# Altium footprint library WR-PHD_Pin Header_2.00mm.PcbLib: 63 footprints (part 2 of 4)
Each footprint in its own frame and in the unit in brackets; x right, y up, seen from the top. Pads: shape width x height; smd on the part's side, far side on the other; paste and mask are expansions set on the pad; w line width, h text height; cw(c..) or ccw(c..) is an arc to the next point about the centre after c.
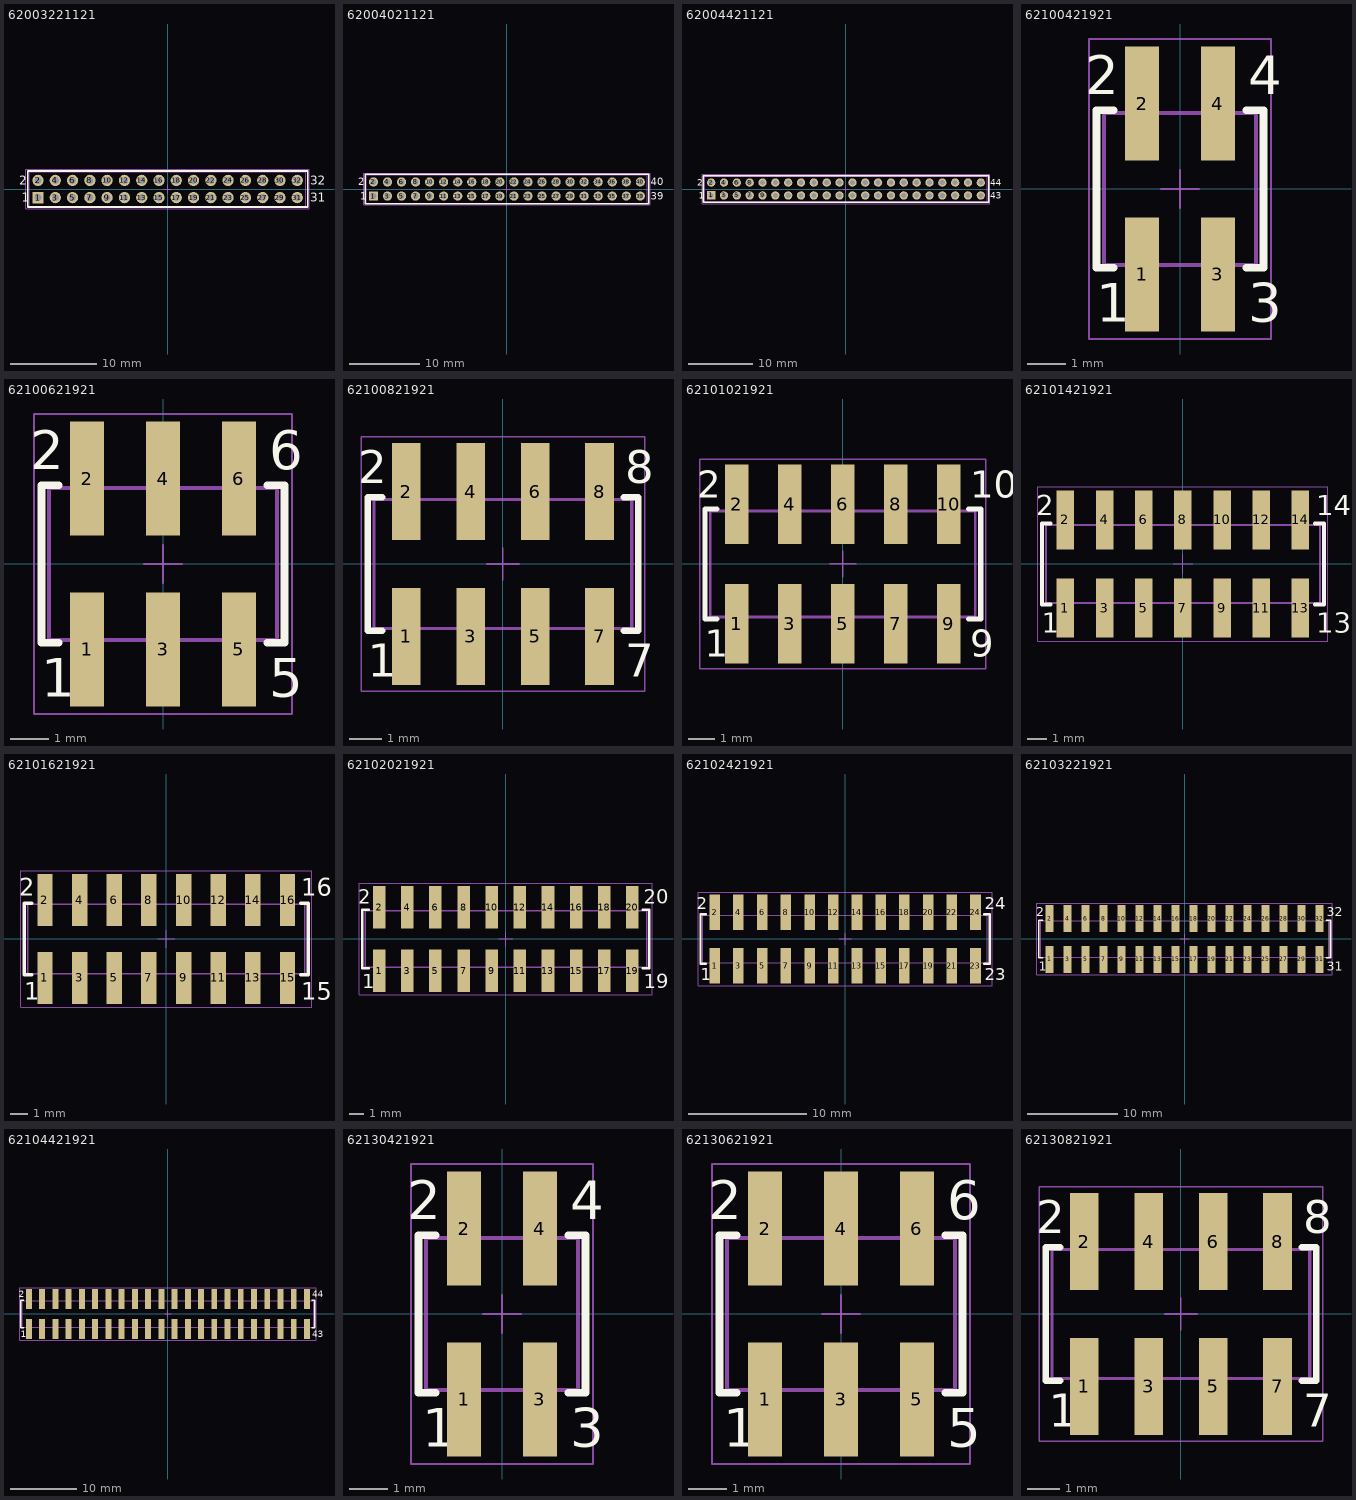
[diagram p1: the footprints below, top view; thin cyan lines are the x and y axes]

## 62003221121 [mm] "2.00 mm THT Dual Pin Header, 32p"
height 6
pads (32):
  rect 1.3x1.3 hole 0.8: 1(-15,-1)
  round 1.3 hole 0.8: 2(-15,1) 3(-13,-1) 4(-13,1) 5(-11,-1) 6(-11,1) 7(-9,-1) 8(-9,1) 9(-7,-1) 10(-7,1) 11(-5,-1) 12(-5,1) 13(-3,-1) 14(-3,1) 15(-1,-1) 16(-1,1) 17(1,-1) 18(1,1) 19(3,-1) 20(3,1) 21(5,-1) 22(5,1) 23(7,-1) 24(7,1) 25(9,-1) 26(9,1) 27(11,-1) 28(11,1) 29(13,-1) 30(13,1) 31(15,-1) 32(15,1)
Top Overlay:
  lines w0.2: -16.2,-2.075 -16.2,2.075 16.2,2.075 16.2,-2.075 -16.2,-2.075
  text "1" at -16.9,-1.5 h1.02
  text "2" at -17.2,0.5 h1.02
  text "32" at 16.5,0.5 h1.02
  text "31" at 16.5,-1.5 h1.02
Mechanical 13:
  lines w0.1: -16,-2 -16,2 16,2 16,-2 -16,-2
Mechanical 15:
  lines w0.05: -0.5,0 0.5,0 ; 0,-0.5 0,0.5 ; -16.4,-2.275 16.4,-2.275 16.4,2.275 -16.4,2.275 -16.4,-2.275
3D body "62003221121.stp": height 6.05, standoff -2.65, extent -16,-2 16,2

## 62004021121 [mm] "2.00 mm THT Dual Pin Header, 40p"
height 6
pads (40):
  rect 1.3x1.3 hole 0.8: 1(-19,-1)
  round 1.3 hole 0.8: 2(-19,1) 3(-17,-1) 4(-17,1) 5(-15,-1) 6(-15,1) 7(-13,-1) 8(-13,1) 9(-11,-1) 10(-11,1) 11(-9,-1) 12(-9,1) 13(-7,-1) 14(-7,1) 15(-5,-1) 16(-5,1) 17(-3,-1) 18(-3,1) 19(-1,-1) 20(-1,1) 21(1,-1) 22(1,1) 23(3,-1) 24(3,1) 25(5,-1) 26(5,1) 27(7,-1) 28(7,1) 29(9,-1) 30(9,1) 31(11,-1) 32(11,1) 33(13,-1) 34(13,1) 35(15,-1) 36(15,1) 37(17,-1) 38(17,1) 39(19,-1) 40(19,1)
Top Overlay:
  lines w0.2: -20.2,-2.075 20.2,-2.075 20.2,2.075 -20.2,2.075 -20.2,-2.075
  text "2" at -21.2,0.5 h1.02
  text "1" at -20.9,-1.5 h1.02
  text "40" at 20.5,0.5 h1.02
  text "39" at 20.5,-1.5 h1.02
Mechanical 13:
  lines w0.1: -20,-2 20,-2 20,2 -20,2 -20,-2
Mechanical 15:
  lines w0.05: -0.5,0 0.5,0 ; 0,-0.5 0,0.5 ; -20.4,-2.275 -20.4,2.275 20.4,2.275 20.4,-2.275 -20.4,-2.275
3D body "62004021121.stp": height 6.05, standoff -2.65, extent -20,-2 20,2

## 62004421121 [mm] "2.00 mm THT Dual Pin Header, 44p"
height 6
pads (44):
  rect 1.3x1.3 hole 0.8: 1(-21,-1)
  round 1.3 hole 0.8: 2(-21,1) 3(-19,-1) 4(-19,1) 5(-17,-1) 6(-17,1) 7(-15,-1) 8(-15,1) 9(-13,-1) 10(-13,1) 11(-11,-1) 12(-11,1) 13(-9,-1) 14(-9,1) 15(-7,-1) 16(-7,1) 17(-5,-1) 18(-5,1) 19(-3,-1) 20(-3,1) 21(-1,-1) 22(-1,1) 23(1,-1) 24(1,1) 25(3,-1) 26(3,1) 27(5,-1) 28(5,1) 29(7,-1) 30(7,1) 31(9,-1) 32(9,1) 33(11,-1) 34(11,1) 35(13,-1) 36(13,1) 37(15,-1) 38(15,1) 39(17,-1) 40(17,1) 41(19,-1) 42(19,1) 43(21,-1) 44(21,1)
Top Overlay:
  lines w0.2: -22.2,-2.075 -22.2,2.075 22.2,2.075 22.2,-2.075 -22.2,-2.075
  text "43" at 22.5,-1.5 h1.02
  text "44" at 22.5,0.5 h1.02
  text "1" at -22.9,-1.5 h1.02
  text "2" at -23.2,0.5 h1.02
Mechanical 13:
  lines w0.1: -22,-2 -22,2 22,2 22,-2 -22,-2
Mechanical 15:
  lines w0.05: -0.5,0 0.5,0 ; 0,-0.5 0,0.5 ; -22.4,-2.275 22.4,-2.275 22.4,2.275 -22.4,2.275 -22.4,-2.275
3D body "62004421121.stp": height 6.05, standoff -2.65, extent -22,-2 22,2

## 62100421921 [mm] "Pin Header, pitch 2.00 mm, SMD, Vertical, dual row, 4p"
height 6.8
pads (4):
  rect 0.89x3 smd: 1(-1,-2.25) 2(-1,2.25) 3(1,-2.25) 4(1,2.25)
Top Overlay:
  lines w0.2: -1.75,-2.075 -2.2,-2.075 -2.2,2.075 -1.75,2.075 ; 1.75,-2.075 2.2,-2.075 2.2,2.075 1.75,2.075
  text "1" at -2.2,-3.5 h1.02
  text "3" at 1.8,-3.5 h1.02
  text "2" at -2.5,2.5 h1.02
  text "4" at 1.8,2.5 h1.02
Mechanical 13:
  lines w0.1: -1.25,-2 -1.25,-3.1 -0.75,-3.1 -0.75,-2 ; -1.25,2 -1.25,3.1 -0.75,3.1 -0.75,2 ; 0.75,-2 0.75,-3.1 1.25,-3.1 1.25,-2 ; 0.75,2 0.75,3.1 1.25,3.1 1.25,2 ; -2,-2 -2,2 2,2 2,-2 -2,-2
Mechanical 15:
  lines w0.05: -0.5,0 0.5,0 ; 0,-0.5 0,0.5 ; -2.4,-3.95 2.4,-3.95 2.4,3.95 -2.4,3.95 -2.4,-3.95
3D body "62100421921.stp": height 6.7, standoff 0, extent -2,-3.1 2,3.1

## 62100621921 [mm] "Pin Header, pitch 2.00 mm, SMD, Vertical, dual row, 6p"
height 6.8
pads (6):
  rect 0.89x3 smd: 1(-2,-2.25) 2(-2,2.25) 3(0,-2.25) 4(0,2.25) 5(2,-2.25) 6(2,2.25)
Top Overlay:
  lines w0.2: -2.75,-2.075 -3.2,-2.075 -3.2,2.075 -2.75,2.075 ; 2.75,-2.075 3.2,-2.075 3.2,2.075 2.75,2.075
  text "2" at -3.5,2.5 h1.02
  text "1" at -3.2,-3.5 h1.02
  text "5" at 2.8,-3.5 h1.02
  text "6" at 2.8,2.5 h1.02
Mechanical 13:
  lines w0.1: -2.25,-2 -2.25,-3.1 -1.75,-3.1 -1.75,-2 ; -2.25,2 -2.25,3.1 -1.75,3.1 -1.75,2 ; -0.25,-2 -0.25,-3.1 0.25,-3.1 0.25,-2 ; -0.25,2 -0.25,3.1 0.25,3.1 0.25,2 ; 1.75,-2 1.75,-3.1 2.25,-3.1 2.25,-2 ; 1.75,2 1.75,3.1 2.25,3.1 2.25,2 ; -3,-2 3,-2 3,2 -3,2 -3,-2
Mechanical 15:
  lines w0.05: -0.5,0 0.5,0 ; 0,-0.5 0,0.5 ; -3.4,-3.95 -3.4,3.95 3.4,3.95 3.4,-3.95 -3.4,-3.95
3D body "62100621921.stp": height 6.7, standoff 0, extent -3,-3.1 3,3.1

## 62100821921 [mm] "Pin Header, pitch 2.00 mm, SMD, Vertical, dual row, 8p"
height 6.8
pads (8):
  rect 0.89x3 smd: 1(-3,-2.25) 2(-3,2.25) 3(-1,-2.25) 4(-1,2.25) 5(1,-2.25) 6(1,2.25) 7(3,-2.25) 8(3,2.25)
Top Overlay:
  lines w0.2: -3.75,-2.075 -4.2,-2.075 -4.2,2.075 -3.75,2.075 ; 3.75,-2.075 4.2,-2.075 4.2,2.075 3.75,2.075
  text "1" at -4.2,-3.5 h1.02
  text "2" at -4.5,2.5 h1.02
  text "7" at 3.8,-3.5 h1.02
  text "8" at 3.8,2.5 h1.02
Mechanical 13:
  lines w0.1: -3.25,-2 -3.25,-3.1 -2.75,-3.1 -2.75,-2 ; -3.25,2 -3.25,3.1 -2.75,3.1 -2.75,2 ; -1.25,-2 -1.25,-3.1 -0.75,-3.1 -0.75,-2 ; -1.25,2 -1.25,3.1 -0.75,3.1 -0.75,2 ; 0.75,-2 0.75,-3.1 1.25,-3.1 1.25,-2 ; 0.75,2 0.75,3.1 1.25,3.1 1.25,2 ; 2.75,-2 2.75,-3.1 3.25,-3.1 3.25,-2 ; 2.75,2 2.75,3.1 3.25,3.1 3.25,2 ; -4,-2 -4,2 4,2 4,-2 -4,-2
Mechanical 15:
  lines w0.05: -0.5,0 0.5,0 ; 0,-0.5 0,0.5 ; -4.4,-3.95 4.4,-3.95 4.4,3.95 -4.4,3.95 -4.4,-3.95
3D body "62100821921.stp": height 6.7, standoff 0, extent -4,-3.1 4,3.1

## 62101021921 [mm] "Pin Header, pitch 2.00 mm, SMD, Vertical, dual row, 10p"
height 6.8
pads (10):
  rect 0.89x3 smd: 1(-4,-2.25) 2(-4,2.25) 3(-2,-2.25) 4(-2,2.25) 5(0,-2.25) 6(0,2.25) 7(2,-2.25) 8(2,2.25) 9(4,-2.25) 10(4,2.25)
Top Overlay:
  lines w0.2: -4.75,-2.075 -5.2,-2.075 -5.2,2.075 -4.75,2.075 ; 4.75,-2.075 5.2,-2.075 5.2,2.075 4.75,2.075
  text "1" at -5.2,-3.5 h1.02
  text "2" at -5.5,2.5 h1.02
  text "9" at 4.8,-3.5 h1.02
  text "10" at 4.8,2.5 h1.02
Mechanical 13:
  lines w0.1: -4.25,-2 -4.25,-3.1 -3.75,-3.1 -3.75,-2 ; -4.25,2 -4.25,3.1 -3.75,3.1 -3.75,2 ; -2.25,-2 -2.25,-3.1 -1.75,-3.1 -1.75,-2 ; -2.25,2 -2.25,3.1 -1.75,3.1 -1.75,2 ; -0.25,-2 -0.25,-3.1 0.25,-3.1 0.25,-2 ; -0.25,2 -0.25,3.1 0.25,3.1 0.25,2 ; 1.75,-2 1.75,-3.1 2.25,-3.1 2.25,-2 ; 1.75,2 1.75,3.1 2.25,3.1 2.25,2 ; 3.75,-2 3.75,-3.1 4.25,-3.1 4.25,-2 ; 3.75,2 3.75,3.1 4.25,3.1 4.25,2 ; -5,-2 -5,2 5,2 5,-2 -5,-2
Mechanical 15:
  lines w0.05: -0.5,0 0.5,0 ; 0,-0.5 0,0.5 ; -5.4,-3.95 5.4,-3.95 5.4,3.95 -5.4,3.95 -5.4,-3.95
3D body "62101021921.stp": height 6.7, standoff 0, extent -5,-3.1 5,3.1

## 62101421921 [mm] "Pin Header, pitch 2.00 mm, SMD, Vertical, dual row, 14p"
height 6.8
pads (14):
  rect 0.89x3 smd: 1(-6,-2.25) 2(-6,2.25) 3(-4,-2.25) 4(-4,2.25) 5(-2,-2.25) 6(-2,2.25) 7(0,-2.25) 8(0,2.25) 9(2,-2.25) 10(2,2.25) 11(4,-2.25) 12(4,2.25) 13(6,-2.25) 14(6,2.25)
Top Overlay:
  lines w0.2: -6.75,-2.075 -7.2,-2.075 -7.2,2.075 -6.75,2.075 ; 6.75,-2.075 7.2,-2.075 7.2,2.075 6.75,2.075
  text "1" at -7.2,-3.5 h1.02
  text "2" at -7.5,2.5 h1.02
  text "13" at 6.8,-3.5 h1.02
  text "14" at 6.8,2.5 h1.02
Mechanical 13:
  lines w0.1: -6.25,-2 -6.25,-3.1 -5.75,-3.1 -5.75,-2 ; -6.25,2 -6.25,3.1 -5.75,3.1 -5.75,2 ; -4.25,-2 -4.25,-3.1 -3.75,-3.1 -3.75,-2 ; -4.25,2 -4.25,3.1 -3.75,3.1 -3.75,2 ; -2.25,-2 -2.25,-3.1 -1.75,-3.1 -1.75,-2 ; -2.25,2 -2.25,3.1 -1.75,3.1 -1.75,2 ; -0.25,-2 -0.25,-3.1 0.25,-3.1 0.25,-2 ; -0.25,2 -0.25,3.1 0.25,3.1 0.25,2 ; 1.75,-2 1.75,-3.1 2.25,-3.1 2.25,-2 ; 1.75,2 1.75,3.1 2.25,3.1 2.25,2 ; 3.75,-2 3.75,-3.1 4.25,-3.1 4.25,-2 ; 3.75,2 3.75,3.1 4.25,3.1 4.25,2 ; 5.75,-2 5.75,-3.1 6.25,-3.1 6.25,-2 ; 5.75,2 5.75,3.1 6.25,3.1 6.25,2 ; -7,-2 -7,2 7,2 7,-2 -7,-2
Mechanical 15:
  lines w0.05: -0.5,0 0.5,0 ; 0,-0.5 0,0.5 ; -7.4,-3.95 7.4,-3.95 7.4,3.95 -7.4,3.95 -7.4,-3.95
3D body "62101421921.stp": height 6.7, standoff 0, extent -7,-3.1 7,3.1

## 62101621921 [mm] "Pin Header, pitch 2.00 mm, SMD, Vertical, dual row, 16p"
height 6.8
pads (16):
  rect 0.89x3 smd: 1(-7,-2.25) 2(-7,2.25) 3(-5,-2.25) 4(-5,2.25) 5(-3,-2.25) 6(-3,2.25) 7(-1,-2.25) 8(-1,2.25) 9(1,-2.25) 10(1,2.25) 11(3,-2.25) 12(3,2.25) 13(5,-2.25) 14(5,2.25) 15(7,-2.25) 16(7,2.25)
Top Overlay:
  lines w0.2: -7.75,-2.075 -8.2,-2.075 -8.2,2.075 -7.75,2.075 ; 7.75,-2.075 8.2,-2.075 8.2,2.075 7.75,2.075
  text "16" at 7.8,2.5 h1.02
  text "15" at 7.8,-3.5 h1.02
  text "2" at -8.5,2.5 h1.02
  text "1" at -8.2,-3.5 h1.02
Mechanical 13:
  lines w0.1: -7.25,-2 -7.25,-3.1 -6.75,-3.1 -6.75,-2 ; -7.25,2 -7.25,3.1 -6.75,3.1 -6.75,2 ; -5.25,-2 -5.25,-3.1 -4.75,-3.1 -4.75,-2 ; -5.25,2 -5.25,3.1 -4.75,3.1 -4.75,2 ; -3.25,-2 -3.25,-3.1 -2.75,-3.1 -2.75,-2 ; -3.25,2 -3.25,3.1 -2.75,3.1 -2.75,2 ; -1.25,-2 -1.25,-3.1 -0.75,-3.1 -0.75,-2 ; -1.25,2 -1.25,3.1 -0.75,3.1 -0.75,2 ; 0.75,-2 0.75,-3.1 1.25,-3.1 1.25,-2 ; 0.75,2 0.75,3.1 1.25,3.1 1.25,2 ; 2.75,-2 2.75,-3.1 3.25,-3.1 3.25,-2 ; 2.75,2 2.75,3.1 3.25,3.1 3.25,2 ; 4.75,-2 4.75,-3.1 5.25,-3.1 5.25,-2 ; 4.75,2 4.75,3.1 5.25,3.1 5.25,2 ; 6.75,-2 6.75,-3.1 7.25,-3.1 7.25,-2 ; 6.75,2 6.75,3.1 7.25,3.1 7.25,2 ; -8,-2 8,-2 8,2 -8,2 -8,-2
Mechanical 15:
  lines w0.05: -0.5,0 0.5,0 ; 0,-0.5 0,0.5 ; -8.4,-3.95 -8.4,3.95 8.4,3.95 8.4,-3.95 -8.4,-3.95
3D body "62101621921.stp": height 6.7, standoff 0, extent -8,-3.1 8,3.1

## 62102021921 [mm] "Pin Header, pitch 2.00 mm, SMD, Vertical, dual row, 20p"
height 6.8
pads (20):
  rect 0.89x3 smd: 1(-9,-2.25) 2(-9,2.25) 3(-7,-2.25) 4(-7,2.25) 5(-5,-2.25) 6(-5,2.25) 7(-3,-2.25) 8(-3,2.25) 9(-1,-2.25) 10(-1,2.25) 11(1,-2.25) 12(1,2.25) 13(3,-2.25) 14(3,2.25) 15(5,-2.25) 16(5,2.25) 17(7,-2.25) 18(7,2.25) 19(9,-2.25) 20(9,2.25)
Top Overlay:
  lines w0.2: -9.75,-2.075 -10.2,-2.075 -10.2,2.075 -9.75,2.075 ; 9.75,-2.075 10.2,-2.075 10.2,2.075 9.75,2.075
  text "20" at 9.8,2.5 h1.02
  text "19" at 9.8,-3.5 h1.02
  text "2" at -10.5,2.5 h1.02
  text "1" at -10.2,-3.5 h1.02
Mechanical 13:
  lines w0.1: -9.25,-2 -9.25,-3.1 -8.75,-3.1 -8.75,-2 ; -9.25,2 -9.25,3.1 -8.75,3.1 -8.75,2 ; -7.25,-2 -7.25,-3.1 -6.75,-3.1 -6.75,-2 ; -7.25,2 -7.25,3.1 -6.75,3.1 -6.75,2 ; -5.25,-2 -5.25,-3.1 -4.75,-3.1 -4.75,-2 ; -5.25,2 -5.25,3.1 -4.75,3.1 -4.75,2 ; -3.25,-2 -3.25,-3.1 -2.75,-3.1 -2.75,-2 ; -3.25,2 -3.25,3.1 -2.75,3.1 -2.75,2 ; -1.25,-2 -1.25,-3.1 -0.75,-3.1 -0.75,-2 ; -1.25,2 -1.25,3.1 -0.75,3.1 -0.75,2 ; 0.75,-2 0.75,-3.1 1.25,-3.1 1.25,-2 ; 0.75,2 0.75,3.1 1.25,3.1 1.25,2 ; 2.75,-2 2.75,-3.1 3.25,-3.1 3.25,-2 ; 2.75,2 2.75,3.1 3.25,3.1 3.25,2 ; 4.75,-2 4.75,-3.1 5.25,-3.1 5.25,-2 ; 4.75,2 4.75,3.1 5.25,3.1 5.25,2 ; 6.75,-2 6.75,-3.1 7.25,-3.1 7.25,-2 ; 6.75,2 6.75,3.1 7.25,3.1 7.25,2 ; 8.75,-2 8.75,-3.1 9.25,-3.1 9.25,-2 ; 8.75,2 8.75,3.1 9.25,3.1 9.25,2 ; -10,-2 10,-2 10,2 -10,2 -10,-2
Mechanical 15:
  lines w0.05: -0.5,0 0.5,0 ; 0,-0.5 0,0.5 ; -10.4,-3.95 -10.4,3.95 10.4,3.95 10.4,-3.95 -10.4,-3.95
3D body "62102021921.stp": height 6.7, standoff 0, extent -10,-3.1 10,3.1

## 62102421921 [mm] "Pin Header, pitch 2.00 mm, SMD, Vertical, dual row, 24p"
height 6.8
pads (24):
  rect 0.89x3 smd: 1(-11,-2.25) 2(-11,2.25) 3(-9,-2.25) 4(-9,2.25) 5(-7,-2.25) 6(-7,2.25) 7(-5,-2.25) 8(-5,2.25) 9(-3,-2.25) 10(-3,2.25) 11(-1,-2.25) 12(-1,2.25) 13(1,-2.25) 14(1,2.25) 15(3,-2.25) 16(3,2.25) 17(5,-2.25) 18(5,2.25) 19(7,-2.25) 20(7,2.25) 21(9,-2.25) 22(9,2.25) 23(11,-2.25) 24(11,2.25)
Top Overlay:
  lines w0.2: -11.75,-2.075 -12.2,-2.075 -12.2,2.075 -11.75,2.075 ; 11.75,-2.075 12.2,-2.075 12.2,2.075 11.75,2.075
  text "1" at -12.2,-3.5 h1.02
  text "2" at -12.5,2.5 h1.02
  text "23" at 11.8,-3.5 h1.02
  text "24" at 11.8,2.5 h1.02
Mechanical 13:
  lines w0.1: -11.25,-2 -11.25,-3.1 -10.75,-3.1 -10.75,-2 ; -11.25,2 -11.25,3.1 -10.75,3.1 -10.75,2 ; -9.25,-2 -9.25,-3.1 -8.75,-3.1 -8.75,-2 ; -9.25,2 -9.25,3.1 -8.75,3.1 -8.75,2 ; -7.25,-2 -7.25,-3.1 -6.75,-3.1 -6.75,-2 ; -7.25,2 -7.25,3.1 -6.75,3.1 -6.75,2 ; -5.25,-2 -5.25,-3.1 -4.75,-3.1 -4.75,-2 ; -5.25,2 -5.25,3.1 -4.75,3.1 -4.75,2 ; -3.25,-2 -3.25,-3.1 -2.75,-3.1 -2.75,-2 ; -3.25,2 -3.25,3.1 -2.75,3.1 -2.75,2 ; -1.25,-2 -1.25,-3.1 -0.75,-3.1 -0.75,-2 ; -1.25,2 -1.25,3.1 -0.75,3.1 -0.75,2 ; 0.75,-2 0.75,-3.1 1.25,-3.1 1.25,-2 ; 0.75,2 0.75,3.1 1.25,3.1 1.25,2 ; 2.75,-2 2.75,-3.1 3.25,-3.1 3.25,-2 ; 2.75,2 2.75,3.1 3.25,3.1 3.25,2 ; 4.75,-2 4.75,-3.1 5.25,-3.1 5.25,-2 ; 4.75,2 4.75,3.1 5.25,3.1 5.25,2 ; 6.75,-2 6.75,-3.1 7.25,-3.1 7.25,-2 ; 6.75,2 6.75,3.1 7.25,3.1 7.25,2 ; 8.75,-2 8.75,-3.1 9.25,-3.1 9.25,-2 ; 8.75,2 8.75,3.1 9.25,3.1 9.25,2 ; 10.75,-2 10.75,-3.1 11.25,-3.1 11.25,-2 ; 10.75,2 10.75,3.1 11.25,3.1 11.25,2 ; -12,-2 -12,2 12,2 12,-2 -12,-2
Mechanical 15:
  lines w0.05: -0.5,0 0.5,0 ; 0,-0.5 0,0.5 ; -12.4,-3.95 12.4,-3.95 12.4,3.95 -12.4,3.95 -12.4,-3.95
3D body "62102421921.stp": height 6.7, standoff 0, extent -12,-3.1 12,3.1

## 62103221921 [mm] "Pin Header, pitch 2.00 mm, SMD, Vertical, dual row, 32p"
height 6.8
pads (32):
  rect 0.89x3 smd: 1(-15,-2.25) 2(-15,2.25) 3(-13,-2.25) 4(-13,2.25) 5(-11,-2.25) 6(-11,2.25) 7(-9,-2.25) 8(-9,2.25) 9(-7,-2.25) 10(-7,2.25) 11(-5,-2.25) 12(-5,2.25) 13(-3,-2.25) 14(-3,2.25) 15(-1,-2.25) 16(-1,2.25) 17(1,-2.25) 18(1,2.25) 19(3,-2.25) 20(3,2.25) 21(5,-2.25) 22(5,2.25) 23(7,-2.25) 24(7,2.25) 25(9,-2.25) 26(9,2.25) 27(11,-2.25) 28(11,2.25) 29(13,-2.25) 30(13,2.25) 31(15,-2.25) 32(15,2.25)
Top Overlay:
  lines w0.2: -15.75,-2.075 -16.2,-2.075 -16.2,2.075 -15.75,2.075 ; 15.75,-2.075 16.2,-2.075 16.2,2.075 15.75,2.075
  text "32" at 15.8,2.5 h1.02
  text "31" at 15.8,-3.5 h1.02
  text "1" at -16.2,-3.5 h1.02
  text "2" at -16.5,2.5 h1.02
Mechanical 13:
  lines w0.1: -15.25,-2 -15.25,-3.1 -14.75,-3.1 -14.75,-2 ; -15.25,2 -15.25,3.1 -14.75,3.1 -14.75,2 ; -13.25,-2 -13.25,-3.1 -12.75,-3.1 -12.75,-2 ; -13.25,2 -13.25,3.1 -12.75,3.1 -12.75,2 ; -11.25,-2 -11.25,-3.1 -10.75,-3.1 -10.75,-2 ; -11.25,2 -11.25,3.1 -10.75,3.1 -10.75,2 ; -9.25,-2 -9.25,-3.1 -8.75,-3.1 -8.75,-2 ; -9.25,2 -9.25,3.1 -8.75,3.1 -8.75,2 ; -7.25,-2 -7.25,-3.1 -6.75,-3.1 -6.75,-2 ; -7.25,2 -7.25,3.1 -6.75,3.1 -6.75,2 ; -5.25,-2 -5.25,-3.1 -4.75,-3.1 -4.75,-2 ; -5.25,2 -5.25,3.1 -4.75,3.1 -4.75,2 ; -3.25,-2 -3.25,-3.1 -2.75,-3.1 -2.75,-2 ; -3.25,2 -3.25,3.1 -2.75,3.1 -2.75,2 ; -1.25,-2 -1.25,-3.1 -0.75,-3.1 -0.75,-2 ; -1.25,2 -1.25,3.1 -0.75,3.1 -0.75,2 ; 0.75,-2 0.75,-3.1 1.25,-3.1 1.25,-2 ; 0.75,2 0.75,3.1 1.25,3.1 1.25,2 ; 2.75,-2 2.75,-3.1 3.25,-3.1 3.25,-2 ; 2.75,2 2.75,3.1 3.25,3.1 3.25,2 ; 4.75,-2 4.75,-3.1 5.25,-3.1 5.25,-2 ; 4.75,2 4.75,3.1 5.25,3.1 5.25,2 ; 6.75,-2 6.75,-3.1 7.25,-3.1 7.25,-2 ; 6.75,2 6.75,3.1 7.25,3.1 7.25,2 ; 8.75,-2 8.75,-3.1 9.25,-3.1 9.25,-2 ; 8.75,2 8.75,3.1 9.25,3.1 9.25,2 ; 10.75,-2 10.75,-3.1 11.25,-3.1 11.25,-2 ; 10.75,2 10.75,3.1 11.25,3.1 11.25,2 ; 12.75,-2 12.75,-3.1 13.25,-3.1 13.25,-2 ; 12.75,2 12.75,3.1 13.25,3.1 13.25,2 ; 14.75,-2 14.75,-3.1 15.25,-3.1 15.25,-2 ; 14.75,2 14.75,3.1 15.25,3.1 15.25,2 ; -16,-2 -16,2 16,2 16,-2 -16,-2
Mechanical 15:
  lines w0.05: -0.5,0 0.5,0 ; 0,-0.5 0,0.5 ; -16.4,-3.95 16.4,-3.95 16.4,3.95 -16.4,3.95 -16.4,-3.95
3D body "62103221921.stp": height 6.7, standoff 0, extent -16,-3.1 16,3.1

## 62104421921 [mm] "Pin Header, pitch 2.00 mm, SMD, Vertical, dual row, 44p"
height 6.8
pads (44):
  rect 0.89x3 smd: 1(-21,-2.25) 2(-21,2.25) 3(-19,-2.25) 4(-19,2.25) 5(-17,-2.25) 6(-17,2.25) 7(-15,-2.25) 8(-15,2.25) 9(-13,-2.25) 10(-13,2.25) 11(-11,-2.25) 12(-11,2.25) 13(-9,-2.25) 14(-9,2.25) 15(-7,-2.25) 16(-7,2.25) 17(-5,-2.25) 18(-5,2.25) 19(-3,-2.25) 20(-3,2.25) 21(-1,-2.25) 22(-1,2.25) 23(1,-2.25) 24(1,2.25) 25(3,-2.25) 26(3,2.25) 27(5,-2.25) 28(5,2.25) 29(7,-2.25) 30(7,2.25) 31(9,-2.25) 32(9,2.25) 33(11,-2.25) 34(11,2.25) 35(13,-2.25) 36(13,2.25) 37(15,-2.25) 38(15,2.25) 39(17,-2.25) 40(17,2.25) 41(19,-2.25) 42(19,2.25) 43(21,-2.25) 44(21,2.25)
Top Overlay:
  lines w0.2: -21.75,-2.075 -22.2,-2.075 -22.2,2.075 -21.75,2.075 ; 21.75,-2.075 22.2,-2.075 22.2,2.075 21.75,2.075
  text "1" at -22.2,-3.5 h1.02
  text "2" at -22.5,2.5 h1.02
  text "43" at 21.8,-3.5 h1.02
  text "44" at 21.8,2.5 h1.02
Mechanical 13:
  lines w0.1: -21.25,-2 -21.25,-3.1 -20.75,-3.1 -20.75,-2 ; -21.25,2 -21.25,3.1 -20.75,3.1 -20.75,2 ; -19.25,-2 -19.25,-3.1 -18.75,-3.1 -18.75,-2 ; -19.25,2 -19.25,3.1 -18.75,3.1 -18.75,2 ; -17.25,-2 -17.25,-3.1 -16.75,-3.1 -16.75,-2 ; -17.25,2 -17.25,3.1 -16.75,3.1 -16.75,2 ; -15.25,-2 -15.25,-3.1 -14.75,-3.1 -14.75,-2 ; -15.25,2 -15.25,3.1 -14.75,3.1 -14.75,2 ; -13.25,-2 -13.25,-3.1 -12.75,-3.1 -12.75,-2 ; -13.25,2 -13.25,3.1 -12.75,3.1 -12.75,2 ; -11.25,-2 -11.25,-3.1 -10.75,-3.1 -10.75,-2 ; -11.25,2 -11.25,3.1 -10.75,3.1 -10.75,2 ; -9.25,-2 -9.25,-3.1 -8.75,-3.1 -8.75,-2 ; -9.25,2 -9.25,3.1 -8.75,3.1 -8.75,2 ; -7.25,-2 -7.25,-3.1 -6.75,-3.1 -6.75,-2 ; -7.25,2 -7.25,3.1 -6.75,3.1 -6.75,2 ; -5.25,-2 -5.25,-3.1 -4.75,-3.1 -4.75,-2 ; -5.25,2 -5.25,3.1 -4.75,3.1 -4.75,2 ; -3.25,-2 -3.25,-3.1 -2.75,-3.1 -2.75,-2 ; -3.25,2 -3.25,3.1 -2.75,3.1 -2.75,2 ; -1.25,-2 -1.25,-3.1 -0.75,-3.1 -0.75,-2 ; -1.25,2 -1.25,3.1 -0.75,3.1 -0.75,2 ; 0.75,-2 0.75,-3.1 1.25,-3.1 1.25,-2 ; 0.75,2 0.75,3.1 1.25,3.1 1.25,2 ; 2.75,-2 2.75,-3.1 3.25,-3.1 3.25,-2 ; 2.75,2 2.75,3.1 3.25,3.1 3.25,2 ; 4.75,-2 4.75,-3.1 5.25,-3.1 5.25,-2 ; 4.75,2 4.75,3.1 5.25,3.1 5.25,2 ; 6.75,-2 6.75,-3.1 7.25,-3.1 7.25,-2 ; 6.75,2 6.75,3.1 7.25,3.1 7.25,2 ; 8.75,-2 8.75,-3.1 9.25,-3.1 9.25,-2 ; 8.75,2 8.75,3.1 9.25,3.1 9.25,2 ; 10.75,-2 10.75,-3.1 11.25,-3.1 11.25,-2 ; 10.75,2 10.75,3.1 11.25,3.1 11.25,2 ; 12.75,-2 12.75,-3.1 13.25,-3.1 13.25,-2 ; 12.75,2 12.75,3.1 13.25,3.1 13.25,2 ; 14.75,-2 14.75,-3.1 15.25,-3.1 15.25,-2 ; 14.75,2 14.75,3.1 15.25,3.1 15.25,2 ; 16.75,-2 16.75,-3.1 17.25,-3.1 17.25,-2 ; 16.75,2 16.75,3.1 17.25,3.1 17.25,2 ; 18.75,-2 18.75,-3.1 19.25,-3.1 19.25,-2 ; 18.75,2 18.75,3.1 19.25,3.1 19.25,2 ; 20.75,-2 20.75,-3.1 21.25,-3.1 21.25,-2 ; 20.75,2 20.75,3.1 21.25,3.1 21.25,2 ; -22,-2 -22,2 22,2 22,-2 -22,-2
Mechanical 15:
  lines w0.05: -0.5,0 0.5,0 ; 0,-0.5 0,0.5 ; -22.4,-3.95 22.4,-3.95 22.4,3.95 -22.4,3.95 -22.4,-3.95
3D body "62104421921.stp": height 6.7, standoff 0, extent -22,-3.1 22,3.1

## 62130421921 [mm] "Pin Header, pitch 2.00 mm, SMD, Vertical, dual row, 4p"
height 6.8
pads (4):
  rect 0.89x3 smd: 1(-1,-2.25) 2(-1,2.25) 3(1,-2.25) 4(1,2.25)
Top Overlay:
  lines w0.2: -1.75,-2.075 -2.2,-2.075 -2.2,2.075 -1.75,2.075 ; 1.75,-2.075 2.2,-2.075 2.2,2.075 1.75,2.075
  text "1" at -2.1,-3.5 h1.02
  text "3" at 1.8,-3.5 h1.02
  text "2" at -2.5,2.5 h1.02
  text "4" at 1.8,2.5 h1.02
Mechanical 13:
  lines w0.1: -1.25,-2 -1.25,-3.1 -0.75,-3.1 -0.75,-2 ; -1.25,2 -1.25,3.1 -0.75,3.1 -0.75,2 ; 0.75,-2 0.75,-3.1 1.25,-3.1 1.25,-2 ; 0.75,2 0.75,3.1 1.25,3.1 1.25,2 ; -2,-2 -2,2 2,2 2,-2 -2,-2
Mechanical 15:
  lines w0.05: -0.5,0 0.5,0 ; 0,-0.5 0,0.5 ; -2.4,-3.95 -2.4,3.95 2.4,3.95 2.4,-3.95 -2.4,-3.95
3D body "62130421921.stp": height 6.7, standoff 0, extent -2,-3.1 2,3.1

## 62130621921 [mm] "Pin Header, pitch 2.00 mm, SMD, Vertical, dual row, 6p"
height 6.8
pads (6):
  rect 0.89x3 smd: 1(-2,-2.25) 2(-2,2.25) 3(0,-2.25) 4(0,2.25) 5(2,-2.25) 6(2,2.25)
Top Overlay:
  lines w0.2: -2.75,-2.075 -3.2,-2.075 -3.2,2.075 -2.75,2.075 ; 2.75,-2.075 3.2,-2.075 3.2,2.075 2.75,2.075
  text "5" at 2.8,-3.5 h1.02
  text "6" at 2.8,2.5 h1.02
  text "1" at -3.1,-3.5 h1.02
  text "2" at -3.5,2.5 h1.02
Mechanical 13:
  lines w0.1: -2.25,-2 -2.25,-3.1 -1.75,-3.1 -1.75,-2 ; -2.25,2 -2.25,3.1 -1.75,3.1 -1.75,2 ; -0.25,-2 -0.25,-3.1 0.25,-3.1 0.25,-2 ; -0.25,2 -0.25,3.1 0.25,3.1 0.25,2 ; 1.75,-2 1.75,-3.1 2.25,-3.1 2.25,-2 ; 1.75,2 1.75,3.1 2.25,3.1 2.25,2 ; -3,-2 -3,2 3,2 3,-2 -3,-2
Mechanical 15:
  lines w0.05: -0.5,0 0.5,0 ; 0,-0.5 0,0.5 ; -3.4,-3.95 -3.4,3.95 3.4,3.95 3.4,-3.95 -3.4,-3.95
3D body "62130621921.stp": height 6.7, standoff 0, extent -3,-3.1 3,3.1

## 62130821921 [mm] "Pin Header, pitch 2.00 mm, SMD, Vertical, dual row, 8p"
height 6.8
pads (8):
  rect 0.89x3 smd: 1(-3,-2.25) 2(-3,2.25) 3(-1,-2.25) 4(-1,2.25) 5(1,-2.25) 6(1,2.25) 7(3,-2.25) 8(3,2.25)
Top Overlay:
  lines w0.2: -3.75,-2.075 -4.2,-2.075 -4.2,2.075 -3.75,2.075 ; 3.75,-2.075 4.2,-2.075 4.2,2.075 3.75,2.075
  text "7" at 3.8,-3.5 h1.02
  text "8" at 3.8,2.5 h1.02
  text "1" at -4.1,-3.5 h1.02
  text "2" at -4.5,2.5 h1.02
Mechanical 13:
  lines w0.1: -3.25,-2 -3.25,-3.1 -2.75,-3.1 -2.75,-2 ; -3.25,2 -3.25,3.1 -2.75,3.1 -2.75,2 ; -1.25,-2 -1.25,-3.1 -0.75,-3.1 -0.75,-2 ; -1.25,2 -1.25,3.1 -0.75,3.1 -0.75,2 ; 0.75,-2 0.75,-3.1 1.25,-3.1 1.25,-2 ; 0.75,2 0.75,3.1 1.25,3.1 1.25,2 ; 2.75,-2 2.75,-3.1 3.25,-3.1 3.25,-2 ; 2.75,2 2.75,3.1 3.25,3.1 3.25,2 ; -4,-2 -4,2 4,2 4,-2 -4,-2
Mechanical 15:
  lines w0.05: -0.5,0 0.5,0 ; 0,-0.5 0,0.5 ; -4.4,-3.95 -4.4,3.95 4.4,3.95 4.4,-3.95 -4.4,-3.95
3D body "62130821921.stp": height 6.7, standoff 0, extent -4,-3.1 4,3.1